# Altium footprint library Capacitor.PcbLib: 73 footprints (part 3 of 5)
Each footprint in its own frame and in the unit in brackets; x right, y up, seen from the top. Pads: shape width x height; smd on the part's side, far side on the other; paste and mask are expansions set on the pad; w line width, h text height; cw(c..) or ccw(c..) is an arc to the next point about the centre after c.
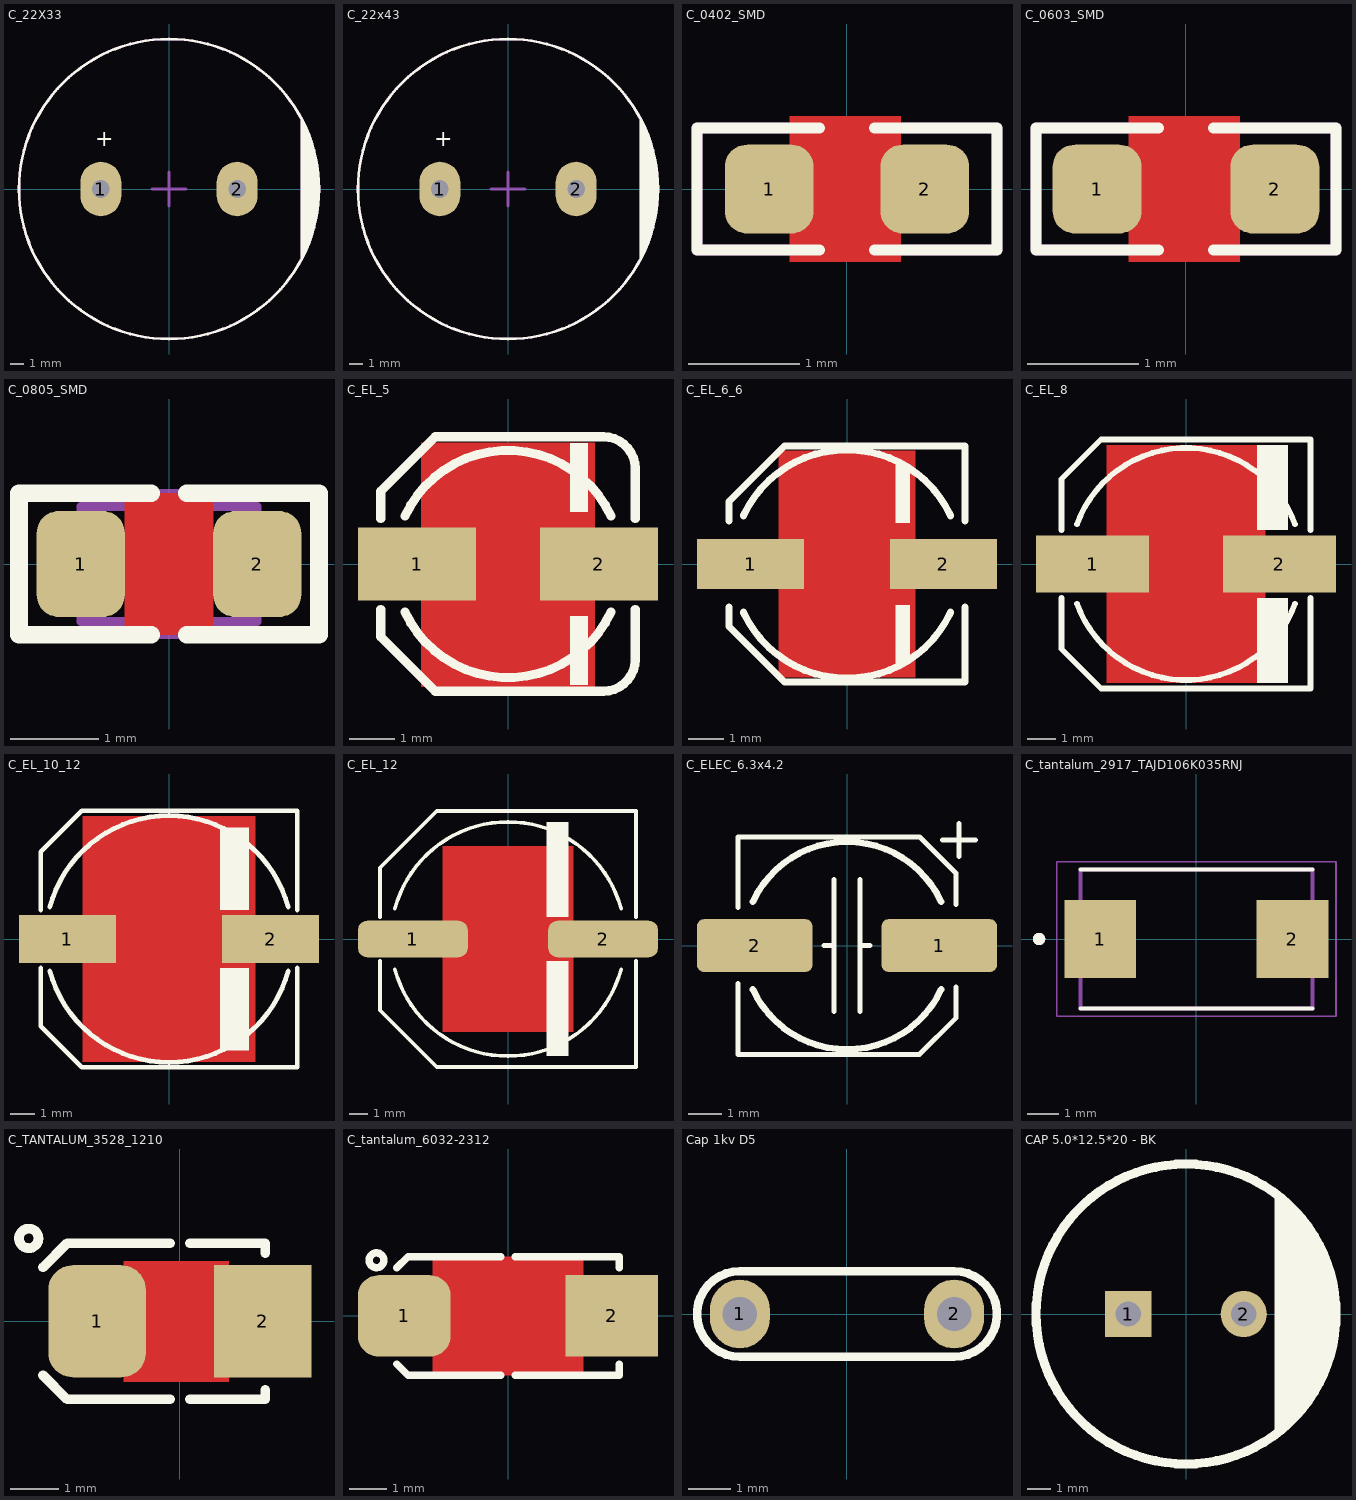
[diagram p2: the footprints below, top view; thin cyan lines are the x and y axes]

## C_22X33 [mm] "10MM Lead Spacing"
height 33
pads (2):
  oval 3x4 hole 1.3: 1(-5,0) 2(5,0)
Top Overlay:
  circle w0.2: c0,0 r11
  region: 9.75,-5 9.75,5 10.75,2.5 11,1 11,0 11,-1 10.5,-3.25
  lines w0.2: 9.75,-5 9.75,5
  text "+" at -5.422,2.75 h2
Top Designator:
  text ".Designator" at -3.71,-0.344 h1.52
Mechanical 12:
  lines w0.15: -0.5,0 0.5,0 ; 0,-0.5 0,0.5
Mechanical 13:
  circle w0.2: c0,0 r11
  lines w0.2: 9.75,-5 9.75,5
Mechanical 15:
  circle w0.2: c0,0 r11
  lines w0.2: -1.25,0 1.25,0 ; 0,-1.25 0,1.25
  text "+" at -5.422,2.75 h2
3D body "CAP ALTH D-22MM L-10MM H-33MM.STEP": height 33.2, standoff -3, extent -11,-10.997 11,10.997

## C_22x43 [mm] "10MM Lead Spacing"
height 43
pads (2):
  oval 3x4 hole 1.3: 1(-5,0) 2(5,0)
Top Overlay:
  circle w0.2: c0,0 r11
  region: 9.75,-5 9.75,5 10.75,2.5 11,1 11,0 11,-1 10.5,-3.25
  lines w0.2: 9.75,-5 9.75,5
  text "+" at -5.422,2.75 h2
Top Designator:
  text ".Designator" at -3.71,-0.344 h1.52
Mechanical 12:
  lines w0.15: -0.5,0 0.5,0 ; 0,-0.5 0,0.5
Mechanical 13:
  circle w0.2: c0,0 r11
  lines w0.2: 9.75,-5 9.75,5
Mechanical 15:
  circle w0.2: c0,0 r11
  circle w0.2: c0,0 r11
  lines w0.2: -1.25,0 1.25,0 ; 0,-1.25 0,1.25
  text "+" at -5.422,2.75 h2
3D body "CAP ALTH D-22MM L-10MM H-43MM.STEP": height 43.2, standoff -3, extent -11,-10.998 11,10.998

## C_0402_SMD [mm]
pads (2):
  rrect50% 0.8x0.8 smd mask+0.075: 1(-0.7,0) 2(0.7,0)
Top Layer:
  pour cut-out: -0.517,0.654 0.483,0.654 0.483,-0.654 -0.517,-0.654
Top Overlay:
  lines w0.1: -0.25,-0.55 -1.35,-0.55 -1.35,0.55 -0.25,0.55 ; 0.25,-0.55 1.35,-0.55 1.35,0.55 0.25,0.55
Top Designator:
  text ".Designator" at -3.71,-0.344 h1.52
Mechanical 15:
  lines w0.1: -1.35,-0.55 1.35,-0.55 1.35,0.55 -1.35,0.55 -1.35,-0.55
3D body "C0402.STEP": height 0.5, standoff 0, extent -0.5,-0.27 0.5,0.23

## C_0603_SMD [mm]
pads (2):
  rrect50% 0.8x0.8 smd mask+0.075: 1(-0.8,0) 2(0.8,0)
Top Layer:
  pour cut-out: -0.517,0.654 0.483,0.654 0.483,-0.654 -0.517,-0.654
Top Overlay:
  lines w0.1: -0.25,-0.55 -1.35,-0.55 -1.35,0.55 -0.25,0.55 ; 0.25,-0.55 1.35,-0.55 1.35,0.55 0.25,0.55
Top Designator:
  text ".Designator" at -3.71,-0.344 h1.52
Mechanical 15:
  lines w0.1: -1.35,-0.55 1.35,-0.55 1.35,0.55 -1.35,0.55 -1.35,-0.55
3D body "User Library-CAPC1608X09.step": height 0.9, standoff 0, extent -0.817,-0.4 0.783,0.4

## C_0805_SMD [mm]
pads (2):
  rrect50% 1x1.2 smd: 1(-1,0) 2(1,0)
Top Layer:
  pour cut-out: -0.5,0.8 0.5,0.8 0.5,-0.8 -0.5,-0.8
Top Overlay:
  lines w0.2: -0.2,-0.8 -1.7,-0.8 -1.7,0.8 -0.2,0.8 ; 0.2,-0.8 1.7,-0.8 1.7,0.8 0.2,0.8
Top Designator:
  text ".Designator" at -3.71,-0.344 h1.52
Mechanical 13:
  lines w0.1: -1,-0.65 -1,0.65 1,0.65 1,-0.65 -1,-0.65
Mechanical 15:
  lines w0.1: -1.7,-0.8 1.7,-0.8 1.7,0.8 -1.7,0.8 -1.7,-0.8
3D body "CAPC2012X10L.step": height 1, standoff 0, extent -1,-0.625 1,0.625

## C_EL_5 [mm] "Electrolytic Cap, D: 5.0mm, L: 5.8mm, Size C"
pads (2):
  rect 2.6x1.6 smd: 1(-2,0) 2(2,0)
Top Layer:
  pour cut-out: 1.905,2.667 1.905,-2.7 -1.905,-2.7 -1.905,2.667
Top Overlay:
  rectangle: 1.36,-2.667 1.76,-1.143
  rectangle: 1.36,1.143 1.76,2.667
  lines w0.2: -2.8,-1 -2.8,-1.6 -1.6,-2.8 2.1,-2.8 ccw(c2.1,-2.1) 2.8,-2.1 2.8,-1 ; -2.8,1 -2.8,1.6 -1.6,2.8 2.1,2.8 cw(c2.1,2.1) 2.8,2.1 2.8,1 ; -2.266,-1.057 ccw(c0,0) 2.266,-1.057 ; -2.266,1.057 cw(c0,0) 2.266,1.057
Top Designator:
  text ".Designator" at -3.71,-0.344 h1.52
3D body "5x5.8x1.4.stp": height -0.4, standoff -6.2, extent -3,-2.65 3,2.65

## C_EL_6_6 [mm] "Electrolytic Cap, D: 6.3mm L: 5.8mm, Size D"
height 5.8
pads (2):
  rect 3x1.4 smd: 1(-2.7,0) 2(2.7,0)
Top Layer:
  pour cut-out: 1.905,3.175 1.905,-3.175 -1.905,-3.175 -1.905,3.175
Top Overlay:
  rectangle: 1.36,-2.8 1.76,-1.143
  rectangle: 1.36,1.143 1.76,2.8
  lines w0.2: -3.3,-1.2 -3.3,-1.75 -1.75,-3.3 3.3,-3.3 3.3,-1.2 ; -3.3,1.2 -3.3,1.75 -1.75,3.3 3.3,3.3 3.3,1.2 ; -2.9,-1.352 ccw(c0,0) 2.9,-1.352 ; -2.9,1.352 cw(c0,0) 2.9,1.352
Top Designator:
  text ".Designator" at -3.71,-0.344 h1.52
3D body "CAPAE-D6.3x5.4 (1).stp": height 5.5, standoff 0, extent -3.9,-3.4 3.9,3.4

## C_EL_8 [mm] "Electrolytic Cap, Size E, Size F, 8.3X10"
height 10
pads (2):
  rect 4x2 smd: 1(-3.3,0) 2(3.3,0)
Top Layer:
  pour cut-out: 2.794,4.191 2.794,-4.191 -2.794,-4.191 -2.794,4.191
Top Overlay:
  rectangle: 2.5,-4.2 3.6,-1.2
  rectangle: 2.5,1.2 3.6,4.2
  lines w0.2: -4.4,-1.2 -4.4,-3 -3,-4.4 4.4,-4.4 4.4,-1.2 ; -4.4,1.2 -4.4,3 -3,4.4 4.4,4.4 4.4,1.2 ; -3.853,-1.402 ccw(c0,0) 3.853,-1.402 ; -3.853,1.402 cw(c0,0) 3.853,1.402
Top Designator:
  text ".Designator" at -3.71,-0.344 h1.52
3D body "CAPAE-D8.0x10.2.stp": height 10.5, standoff 0, extent -5,-4.25 5,4.25

## C_EL_10_12 [mm] "Electrolytic Cap, 10.3mm, L: 12.4mm"
height 12.4
pads (2):
  rect 4x2 smd: 1(-4.2,0) 2(4.2,0)
Top Layer:
  pour cut-out: -3.556,5.08 -3.556,-5.08 3.556,-5.08 3.556,5.08
Top Overlay:
  rectangle: 2.1,1.2 3.3,4.6
  rectangle: 2.1,-4.6 3.3,-1.2
  lines w0.2: -5.3,-1.2 -5.3,-3.6 -3.6,-5.3 5.3,-5.3 5.3,-1.2 ; -5.3,1.2 -5.3,3.6 -3.6,5.3 5.3,5.3 5.3,1.2 ; -4.926,-1.32 ccw(c0,0) 4.926,-1.32 ; -4.926,1.32 cw(c0,0) 4.926,1.32
Top Designator:
  text ".Designator" at -3.71,-0.344 h1.52
3D body "10x12.4x4.5.stp": height 12.45, standoff 0.05, extent -5.5,-5.15 5.5,5.15

## C_EL_12 [mm] "Electrolytic Cap, 12.5x13mm"
height 10
pads (2):
  rrect50% 6x2 smd mask+0.1: 1(-5.2,0) 2(5.2,0)
Top Layer:
  pour cut-out: -3.556,5.08 -3.556,-5.08 3.556,-5.08 3.556,5.08
Top Overlay:
  rectangle: 2.1,1.2 3.3,6.4
  rectangle: 2.1,-6.4 3.3,-1.2
  lines w0.2: -7,-1.2 -7,-3.9 -3.9,-7 7,-7 7,-1.2 ; -7,1.2 -7,3.9 -3.9,7 7,7 7,1.2 ; -6.182,-1.656 ccw(c0,0) 6.182,-1.656 ; -6.182,1.656 cw(c0,0) 6.182,1.656
Top Designator:
  text ".Designator" at -3.71,-0.344 h1.52
3D body "User Library-ALU-H16.step": height 17, standoff 0, extent -7.75,-6.85 7.75,6.85

## C_ELEC_6.3x4.2 [mm] "Capacitor, polarized, aluminum can; 6.3x4.2mm DxH"
height 4.2
pads (2):
  rrect25% 3.5x1.6 smd: 1(2.8,0) 2(-2.8,0)
Top Overlay:
  lines w0.152: -3.3,-1.15 -3.3,-3.3 2.2,-3.3 3.3,-2.2 3.3,-1.25 ; -3.3,1.15 -3.3,3.3 2.2,3.3 3.3,2.2 3.3,1.25 ; -0.7,0 -0.5,0 ; -0.4,-2 -0.4,2 ; 0.4,-2 0.4,2 ; 0.5,0 0.7,0 ; 2.9,3.2 3.4,3.2 3.9,3.2 ; 3.4,2.7 3.4,3.7
  lines w0.2: -2.855,-1.331 ccw(c0,0) 2.855,-1.331 ; -2.855,1.331 cw(c0,0) 2.855,1.331
Top Designator:
  text ".Designator" at -3.71,-0.144 h1.52
3D body "Cap, elec, 6.3x4.2.STEP": height 4.23, standoff 0, extent -3.3,-3.3 3.3,3.3

## C_tantalum_2917_TAJD106K035RNJ [mm] "Conventional MnO2,10 uF,35 V"
height 2.8
pads (2):
  rect 2.31x2.52 smd: 1(-3.1,0) 2(3.1,0)
Top Overlay:
  circle w0.2: c-5.08,0 r0.1
  lines w0.127: -3.75,-2.25 3.75,-2.25 ; -3.75,2.25 3.75,2.25
Mechanical 13:
  circle w0.2: c-5.08,0 r0.1
  lines w0.127: -3.75,-2.25 -3.75,2.25 3.75,2.25 3.75,-2.25 -3.75,-2.25
Mechanical 15:
  lines w0.05: -4.505,-2.5 -4.505,2.5 4.505,2.5 4.505,-2.5 -4.505,-2.5
3D body "User Library-CAP_TANT_6032-28_y.step": height 2.8, standoff 0, extent -3.15,-1.75 3.15,1.75

## C_TANTALUM_3528_1210 [mm] "3.5 x 2.8 x 2.1mm"
height 2.1
pads (2):
  rrect50% 2x2.3 smd: 1(-1.7,0)
  rect 2x2.3 smd: 2(1.7,0)
Top Layer:
  pour cut-out: -1.149,1.236 1,1.236 1,-1.243 -1.149,-1.243
Top Overlay:
  circle w0.2: c-3.1,1.7 r0.2
  lines w0.2: -2.806,-1.106 -2.312,-1.6 -0.2,-1.6 ; -2.806,1.106 -2.312,1.6 -0.2,1.6 ; 0.2,-1.6 1.75,-1.6 1.75,-1.401 ; 0.2,1.6 1.75,1.6 1.75,1.399
Top Designator:
  text ".Designator" at -4.01,-0.194 h1.52
3D body "B 3528-21.step": height 1.93, standoff 0.01, extent -1.75,-1.4 1.75,1.4

## C_tantalum_6032-2312 [mm] "CAPACITOR, TAN C, TAN F, TAN U, TAN L, 6032P, 6.0X3.2mm"
height 2.8
pads (2):
  rrect50% 2.5x2.2 smd: 1(-2.8,0)
  rect 2.5x2.2 smd: 2(2.8,0)
Top Layer:
  pour cut-out: -2.032,1.6 2.032,1.6 2.032,-1.6 -2.032,-1.6
Top Overlay:
  circle w0.2: c-3.55,1.5 r0.2
  lines w0.2: -3,-1.3 -2.7,-1.6 -0.2,-1.6 ; -3,1.3 -2.7,1.6 -0.2,1.6 ; 0.2,-1.6 3,-1.6 3,-1.3 ; 0.2,1.6 3,1.6 3,1.3
Top Designator:
  text ".Designator" at -3.71,-0.319 h1.52
3D body "User Library-CAP_TANT_6032-28_y.step": height 2.8, standoff 0, extent -3.15,-1.75 3.15,1.75

## Cap 1kv D5 [mm]
pads (2):
  oval 1.4x1.6 hole 0.8 mask+0.075: 1(-2.5,0) 2(2.5,0)
Top Overlay:
  lines w0.2: -2.5,-1 cw(c-2.5,0) -2.5,1 2.5,1 cw(c2.5,0) 2.5,-1 -2.5,-1
Top Designator:
  text ".Designator" at -3.71,-0.344 h1.52
3D body "Cap 5mm Adasi.STEP": height 1, standoff -7.5, extent -3.495,-0.848 3.5,0.848

## CAP 5.0*12.5*20 - BK [mm] "½Å¾à5mmÖ±¾¶12.5mm¸ß¶È20mm"
pads (2):
  rect 2x2 hole 1.1: 1(-2.5,0)
  round 2 hole 1.1: 2(2.5,0)
Top Overlay:
  circle w0.4: c0,0 r6.5
  region: 3.841,-5.183 4.144,-4.958 4.695,-4.44 5.181,-3.862 5.596,-3.231 5.935,-2.556 6.193,-1.846 6.366,-1.11 6.452,-0.36 6.45,0.396 6.36,1.146 6.183,1.88 5.921,2.589 5.578,3.262 5.159,3.891 4.67,4.467 4.117,4.981 3.812,5.204 3.841,5.244
Top Designator:
  text ".Designator" at -3.71,-0.344 h1.52
3D body "CAP 5X12.5X20.STEP": height 20.04, standoff -3.37, extent -6.238,-6.25 6.26,6.25